# Altium footprint library Robot_2020.PcbLib: 86 footprints (part 5 of 6)
Each footprint in its own frame and in the unit in brackets; x right, y up, seen from the top. Pads: shape width x height; smd on the part's side, far side on the other; paste and mask are expansions set on the pad; w line width, h text height; cw(c..) or ccw(c..) is an arc to the next point about the centre after c.
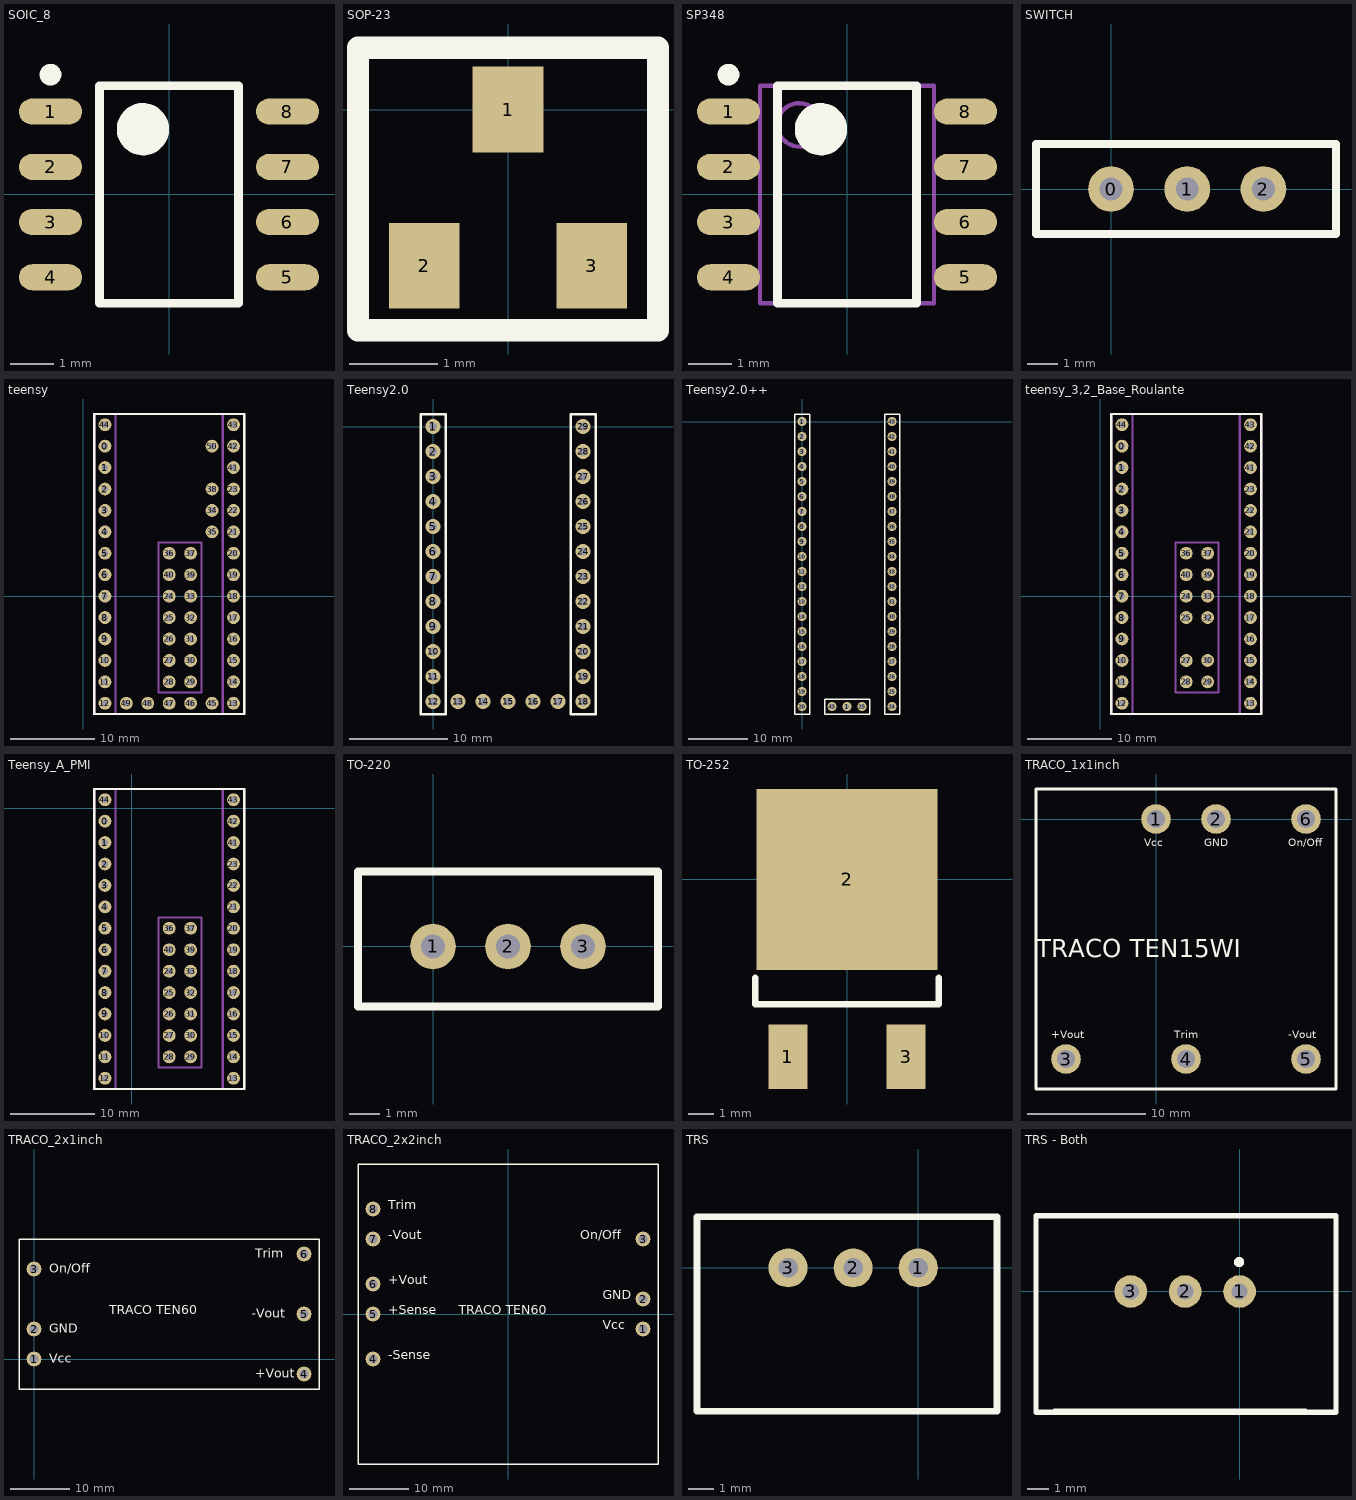
[diagram p4: the footprints below, top view; thin cyan lines are the x and y axes]

## SOIC_8 [mm] "SOIC, 8-Leads, Body 4,90x3,90mm, Pitch 1,27mm, IPC Medium Density"
height 1.75
pads (8):
  oval 1.45x0.6 smd: 1(-2.725,1.905) 2(-2.725,0.635) 3(-2.725,-0.635) 4(-2.725,-1.905) 5(2.725,-1.905) 6(2.725,-0.635) 7(2.725,0.635) 8(2.725,1.905)
Top Overlay:
  circle w0.25: c-2.725,2.755 r0.125
  circle w0.6: c-0.6,1.5 r0.3
  lines w0.2: -1.6,-2.5 -1.6,2.5 1.6,2.5 1.6,-2.5 -1.6,-2.5
3D body: height 1.75, standoff 0.1, extent -2,-2.5 2,2.5

## SOP-23 [mm]
pads (3):
  rect 0.802x0.972 smd: 1(0,0) 2(-0.95,-1.77) 3(0.95,-1.77)
Top Overlay:
  lines w0.254: -1.7,-2.5 1.7,-2.5 1.7,0.7 -0.2,0.7 -1.7,0.7 -1.7,-2.5

## SP348 [mm] "SOIC, SP348 Transceiver"
height 1.75
pads (8):
  oval 1.45x0.6 smd: 1(-2.725,1.905) 2(-2.725,0.635) 3(-2.725,-0.635) 4(-2.725,-1.905) 5(2.725,-1.905) 6(2.725,-0.635) 7(2.725,0.635) 8(2.725,1.905)
Top Overlay:
  circle w0.6: c-0.6,1.5 r0.3
  circle w0.25: c-2.725,2.755 r0.125
  lines w0.2: -1.6,-2.5 1.6,-2.5 1.6,2.5 -1.6,2.5 -1.6,-2.5
Mechanical 13:
  circle w0.1: c-1.1,1.6 r0.5
  lines w0.1: -2,-2.5 2,-2.5 2,2.5 -2,2.5 -2,-2.5
3D body: height 1.75, standoff 0.1, extent -2,-2.5 2,2.5

## SWITCH [mil] "2 pos switch,  09.03290.01"
height 314.96
pads (3):
  round 60 hole 30: 0(0,0) 1(100,0) 2(200,0)
Top Overlay:
  lines w10: -98.43,-59.06 -98.43,59.06 295.28,59.06 295.28,-59.06 -98.43,-59.06
3D body: height 291.34, standoff 208.66, extent 0,-59.06 78.74,59.06
3D body: height 177.17, standoff 0, extent -98.43,-59.06 295.28,59.06
3D body: height 208.66, standoff 177.17, extent -98.43,-59.06 177.17,59.06

## teensy [mil] "Teensy 3.2"
pads (51):
  round 60 hole 30: 0(100,700) 1(100,600) 2(100,500) 3(100,400) 4(100,300) 5(100,200) 6(100,100) 7(100,0) 8(100,-100) 9(100,-200) 10(100,-300) 11(100,-400) 12(100,-500) 13(700,-500) 14(700,-400) 15(700,-300) 16(700,-200) 17(700,-100) 18(700,0) 19(700,100) 20(700,200) 21(700,300) 22(700,400) 23(700,500) 24(400,0) 25(400,-100) 26(400,-200) 27(400,-300) 28(400,-400) 29(500,-400) 30(500,-300) 31(500,-200) 32(500,-100) 33(500,0) 34(600,400) 35(600,300) 36(400,200) 37(500,200) 38(600,500) 39(500,100) 40(400,100) 41(700,600) 42(700,700) 43(700,800) 44(100,800) 45(600,-500) 46(500,-500) 47(400,-500) 48(300,-500) 49(200,-500) 50(600,700)
Top Overlay:
  lines w10: 50,-550 750,-550 750,850 50,850 50,-550
Mechanical 1:
  lines w10: 48.14,-550 150,-550 150,850 50,850 50,-548.14 48.14,-550 ; 350,-450 550,-450 550,250 350,250 350,-450 ; 650,-550 750,-550 750,850 650,850 650,-550
3D body "Pin Header 1x1 TH 2.54mm Pitch.stp": height 396.85, standoff -53.15, extent 50,-549.99 150,-449.99
3D body "Pin Header 1x1 TH 2.54mm Pitch.stp": height 396.85, standoff -53.15, extent 50,-449.99 150,-349.99
3D body "Pin Header 1x1 TH 2.54mm Pitch.stp": height 396.85, standoff -53.15, extent 50,-349.99 150,-249.99
3D body "Pin Header 1x1 TH 2.54mm Pitch.stp": height 396.85, standoff -53.15, extent 50,-249.99 150,-149.99
3D body "Pin Header 1x1 TH 2.54mm Pitch.stp": height 396.85, standoff -53.15, extent 50,-149.99 150,-49.99
3D body "Pin Header 1x1 TH 2.54mm Pitch.stp": height 396.85, standoff -53.15, extent 50,-49.99 150,50.01
3D body "Pin Header 1x1 TH 2.54mm Pitch.stp": height 396.85, standoff -53.15, extent 50,50.01 150,150.01
3D body "Pin Header 1x1 TH 2.54mm Pitch.stp": height 396.85, standoff -53.15, extent 50,150.01 150,250.01
3D body "Pin Header 1x1 TH 2.54mm Pitch.stp": height 396.85, standoff -53.15, extent 50,250.01 150,350.01
3D body "Pin Header 1x1 TH 2.54mm Pitch.stp": height 396.85, standoff -53.15, extent 50,350.01 150,450.01
3D body "Pin Header 1x1 TH 2.54mm Pitch.stp": height 396.85, standoff -53.15, extent 50,450.01 150,550.01
3D body "Pin Header 1x1 TH 2.54mm Pitch.stp": height 396.85, standoff -53.15, extent 50,550.01 150,650.01
3D body "Pin Header 1x1 TH 2.54mm Pitch.stp": height 396.85, standoff -53.15, extent 50,650.01 150,750.01
3D body "Pin Header 1x1 TH 2.54mm Pitch.stp": height 396.85, standoff -53.15, extent 50,750.01 150,850.01
3D body "Pin Header 1x1 TH 2.54mm Pitch.stp": height 396.85, standoff -53.15, extent 650,750.01 750,850.01
3D body "Pin Header 1x1 TH 2.54mm Pitch.stp": height 396.85, standoff -53.15, extent 650,650.01 750,750.01
3D body "Pin Header 1x1 TH 2.54mm Pitch.stp": height 396.85, standoff -53.15, extent 650,550.01 750,650.01
3D body "Pin Header 1x1 TH 2.54mm Pitch.stp": height 396.85, standoff -53.15, extent 650,450.01 750,550.01
3D body "Pin Header 1x1 TH 2.54mm Pitch.stp": height 396.85, standoff -53.15, extent 650,350.01 750,450.01
3D body "Pin Header 1x1 TH 2.54mm Pitch.stp": height 396.85, standoff -53.15, extent 650,250.01 750,350.01
3D body "Pin Header 1x1 TH 2.54mm Pitch.stp": height 396.85, standoff -53.15, extent 650,150.01 750,250.01
3D body "Pin Header 1x1 TH 2.54mm Pitch.stp": height 396.85, standoff -53.15, extent 650,50.01 750,150.01
3D body "Pin Header 1x1 TH 2.54mm Pitch.stp": height 396.85, standoff -53.15, extent 650,-49.99 750,50.01
3D body "Pin Header 1x1 TH 2.54mm Pitch.stp": height 396.85, standoff -53.15, extent 650,-149.99 750,-49.99
3D body "Pin Header 1x1 TH 2.54mm Pitch.stp": height 396.85, standoff -53.15, extent 650,-249.99 750,-149.99
3D body "Pin Header 1x1 TH 2.54mm Pitch.stp": height 396.85, standoff -53.15, extent 650,-349.99 750,-249.99
3D body "Pin Header 1x1 TH 2.54mm Pitch.stp": height 396.85, standoff -53.15, extent 650,-449.99 750,-349.99
3D body "zl305-14s_p2-54_l36-06_w2-5_h5.stp": height 196.85, standoff -118.11, extent 49.79,-559 148.21,860.69
3D body "zl305-14s_p2-54_l36-06_w2-5_h5.stp": height 196.85, standoff -118.11, extent 650.57,-561 749,858.69
3D body "Pin Header 1x1 TH 2.54mm Pitch.stp": height 396.85, standoff -53.15, extent 650,-549.99 750,-449.99
3D body: height 331.89, standoff 0, extent 350.02,-449.98 549.98,249.98
3D body "Teensy_3-2.stp": height 468.14, standoff 216.54, extent 49.28,-552.34 753,904.34

## Teensy2.0 [mil] "Teensy2.0 with minimal"
pads (29):
  round 60 hole 31.5: 1(0,0) 2(0,-100) 3(0,-200) 4(0,-300) 5(0,-400) 6(0,-500) 7(0,-600) 8(0,-700) 9(0,-800) 10(0,-900) 11(0,-1000) 12(0,-1100) 13(100,-1100) 14(200,-1100) 15(300,-1100) 16(400,-1100) 17(500,-1100) 18(600,-1100) 19(600,-1000) 20(600,-900) 21(600,-800) 22(600,-700) 23(600,-600) 24(600,-500) 25(600,-400) 26(600,-300) 27(600,-200) 28(600,-100) 29(600,0)
Top Overlay:
  lines w10: -50,-1150 -50,50 50,50 50,-1150 -50,-1150 ; 550,-1150 650,-1150 650,50 550,50 550,-1150
3D body: height 255.91, standoff 0, extent 50,-1150 550,-1050
3D body: height 255.91, standoff 0, extent 550,-1150 650,50
3D body: height 255.91, standoff 0, extent -50,-1150 50,50

## Teensy2.0++ [mil]
pads (43):
  round 60 hole 31.5: 1(0,0) 1(300,-1900) 2(0,-100) 3(0,-200) 4(0,-300) 5(0,-400) 6(0,-500) 7(0,-600) 8(0,-700) 9(0,-800) 10(0,-900) 11(0,-1000) 12(0,-1100) 13(0,-1200) 14(0,-1300) 15(0,-1400) 16(0,-1500) 17(0,-1600) 18(0,-1700) 19(0,-1800) 20(0,-1900) 23(400,-1900) 24(600,-1900) 25(600,-1800) 26(600,-1700) 27(600,-1600) 28(600,-1500) 29(600,-1400) 30(600,-1300) 31(600,-1200) 32(600,-1100) 33(600,-1000) 34(600,-900) 35(600,-800) 36(600,-700) 37(600,-600) 38(600,-500) 39(600,-400) 40(600,-300) 41(600,-200) 42(600,-100) 43(200,-1900) 43(600,0)
Top Overlay:
  lines w10: -50,-1950 50,-1950 50,50 -50,50 -50,-1950 ; 150,-1950 150,-1850 450,-1850 450,-1950 150,-1950 ; 550,-1950 550,50 650,50 650,-1950 550,-1950
3D body: height 255.91, standoff 0, extent 150,-1950 450,-1850
3D body: height 255.91, standoff 0, extent 550,-1950 650,50
3D body: height 255.91, standoff 0, extent -50,-1950 50,50
3D body "Teensy++2.0.STEP": height 572.84, standoff 31.5, extent -50,-1951.97 650,51.97

## teensy_3,2_Base_Roulante [mil] "Teensy 3.2"
pads (40):
  round 60 hole 30: 0(100,700) 1(100,600) 2(100,500) 3(100,400) 4(100,300) 5(100,200) 6(100,100) 7(100,0) 8(100,-100) 9(100,-200) 10(100,-300) 11(100,-400) 12(100,-500) 13(700,-500) 14(700,-400) 15(700,-300) 16(700,-200) 17(700,-100) 18(700,0) 19(700,100) 20(700,200) 21(700,300) 22(700,400) 23(700,500) 24(400,0) 25(400,-100) 27(400,-300) 28(400,-400) 29(500,-400) 30(500,-300) 32(500,-100) 33(500,0) 36(400,200) 37(500,200) 39(500,100) 40(400,100) 41(700,600) 42(700,700) 43(700,800) 44(100,800)
Top Overlay:
  lines w10: 50,-550 50,850 750,850 750,-550 50,-550
Mechanical 1:
  lines w10: 48.14,-550 50,-548.14 50,850 150,850 150,-550 48.14,-550 ; 350,-450 350,250 550,250 550,-450 350,-450 ; 650,-550 650,850 750,850 750,-550 650,-550
3D body "Teensy_3-2.stp": height 504.76, standoff 253.15, extent 48.14,-550 751.86,906.68
3D body: height 331.89, standoff 0, extent 650.02,-549.98 749.98,849.98
3D body: height 331.89, standoff 0, extent 48.09,-550.02 150.02,850.02
3D body: height 331.89, standoff 0, extent 350.02,-449.98 549.98,249.98

## Teensy_A_PMI [mil]
pads (42):
  round 60 hole 30: 0(-124.41,-59.84) 1(-124.41,-159.84) 2(-124.41,-259.84) 3(-124.41,-359.84) 4(-124.41,-459.84) 5(-124.41,-559.84) 6(-124.41,-659.84) 7(-124.41,-759.84) 8(-124.41,-859.84) 9(-124.41,-959.84) 10(-124.41,-1059.84) 11(-124.41,-1159.84) 12(-124.41,-1259.84) 13(475.59,-1259.84) 14(475.59,-1159.84) 15(475.59,-1059.84) 16(475.59,-959.84) 17(475.59,-859.84) 18(475.59,-759.84) 19(475.59,-659.84) 20(475.59,-559.84) 21(475.59,-459.84) 22(475.59,-359.84) 23(475.59,-259.84) 24(175.59,-759.84) 25(175.59,-859.84) 26(175.59,-959.84) 27(175.59,-1059.84) 28(175.59,-1159.84) 29(275.59,-1159.84) 30(275.59,-1059.84) 31(275.59,-959.84) 32(275.59,-859.84) 33(275.59,-759.84) 36(175.59,-559.84) 37(275.59,-559.84) 39(275.59,-659.84) 40(175.59,-659.84) 41(475.59,-159.84) 42(475.59,-59.84) 43(475.59,40.16) 44(-124.41,40.16)
Top Overlay:
  lines w10: -174.41,-1309.84 -174.41,90.16 525.59,90.16 525.59,-1309.84 -174.41,-1309.84
Mechanical 1:
  lines w10: -176.27,-1309.84 -174.41,-1307.98 -174.41,90.16 -74.41,90.16 -74.41,-1309.84 -176.27,-1309.84 ; 125.59,-1209.84 125.59,-509.84 325.59,-509.84 325.59,-1209.84 125.59,-1209.84 ; 425.59,-1309.84 425.59,90.16 525.59,90.16 525.59,-1309.84 425.59,-1309.84
3D body "Teensy_3-2.stp": height 504.76, standoff 253.15, extent -176.27,-1309.84 527.45,146.83
3D body: height 331.89, standoff 0, extent 425.61,-1309.82 525.57,90.14
3D body: height 331.89, standoff 0, extent -176.32,-1309.86 -74.39,90.18
3D body: height 331.89, standoff 0, extent 125.61,-1209.82 325.57,-509.86

## TO-220 [mil]
pads (3):
  round 60 hole 31.5: 1(0,0) 2(98.43,0) 3(196.85,0)
Top Overlay:
  lines w10: -98.43,-78.74 -98.43,98.43 295.28,98.43 295.28,-78.74 -98.43,-78.74

## TO-252 [mm] "TO-252 standard package"
pads (3):
  rect 1.5x2.5 smd: 1(-2.286,-6.858) 3(2.286,-6.858)
  rect 7x7 smd: 2(0,0)
Top Overlay:
  lines w0.254: -3.556,-3.81 -3.556,-4.826 3.556,-4.826 3.556,-3.81
3D body "TO252.STEP": height 2.41, standoff 0.01, extent -3.25,-7.112 3.25,1.988

## TRACO_1x1inch [mm]
pads (6):
  round 2.5 hole 1.5: 1(0,0) 2(5.08,0) 3(-7.62,-20.32) 4(2.54,-20.32) 5(12.7,-20.32) 6(12.7,0)
Top Overlay:
  lines w0.254: -10.16,-22.86 15.24,-22.86 15.24,2.54 -10.16,2.54 -10.16,-22.86
  text "On/Off" at 11.176,-2.286 h0.64
  text "GND" at 4.064,-2.286 h0.64
  text "Vcc" at -1.016,-2.286 h0.64
  text "-Vout" at 11.176,-18.542 h0.64
  text "Trim" at 1.524,-18.542 h0.64
  text "+Vout" at -8.89,-18.542 h0.64
  text "TRACO TEN15WI" at -10.16,-11.684 h1.52
3D body "Traco_1x1inch.stp": height 10.11, standoff -5.59, extent -10.16,-22.86 15.24,2.54

## TRACO_2x1inch [mm]
pads (6):
  round 2.5 hole 1.5: 1(0,0) 2(0,5.08) 3(0,15.24) 4(45.72,-2.54) 5(45.72,7.62) 6(45.72,17.78)
Top Overlay:
  lines w0.254: -2.54,-5.08 48.26,-5.08 48.26,20.32 -2.54,20.32 -2.54,-5.08
  text "TRACO TEN60" at 12.7,7.62 h1.52
  text "Vcc" at 2.54,-0.635 h1.52
  text "GND" at 2.54,4.445 h1.52
  text "On/Off" at 2.54,14.605 h1.52
  text "+Vout" at 37.465,-3.175 h1.52
  text "-Vout" at 36.83,6.985 h1.52
  text "Trim" at 37.465,17.145 h1.52
3D body "Traco_2x1Inch.stp": height 10.21, standoff -5.59, extent -2.54,-5.08 48.26,20.32

## TRACO_2x2inch [mm]
pads (8):
  round 2.5 hole 1.5: 1(22.86,-2.54) 2(22.86,2.54) 3(22.86,12.7) 4(-22.86,-7.62) 5(-22.86,0) 6(-22.86,5.08) 7(-22.86,12.7) 8(-22.86,17.78)
Top Overlay:
  lines w0.254: -25.4,-25.4 25.4,-25.4 25.4,25.4 -25.4,25.4 -25.4,-25.4
  text "On/Off" at 12.192,12.7 h1.52
  text "GND" at 16.002,2.54 h1.52
  text "Vcc" at 16.002,-2.54 h1.52
  text "-Sense" at -20.32,-7.62 h1.52
  text "+Sense" at -20.32,0 h1.52
  text "+Vout" at -20.32,5.08 h1.52
  text "-Vout" at -20.32,12.7 h1.52
  text "Trim" at -20.32,17.78 h1.52
  text "TRACO TEN60" at -8.382,0 h1.52

## TRS [mil]
height 401.57
pads (3):
  round 60 hole 30: 1(0,0) 2(-100,0) 3(-200,0)
Top Overlay:
  lines w10: -339.76,-220.47 -339.76,78.74 120.87,78.74 120.87,-220.47 -339.76,-220.47
3D body "TSR 1-2450.stp": height 398.14, standoff -160.91, extent -340.63,-217.64 120,79.61

## TRS - Both [mil]
height 401.57
pads (3):
  round 60 hole 30: 1(0,0) 2(-100,0) 3(-200,0)
Top Overlay:
  circle w10: c-1,54 r4.24
  lines w10: -339.76,-220.47 120.87,-220.47 ; -374.02,-222 177.17,-222 177.17,139.21 -374.02,139.21 -374.02,-222
3D body: height 397.64, standoff 0, extent -374.02,-157.48 177.17,137.8